# Altium footprint library chipfc_libs.PCBLIB: 315 footprints (part 11 of 20)
Each footprint in its own frame and in the unit in brackets; x right, y up, seen from the top. Pads: shape width x height; smd on the part's side, far side on the other; paste and mask are expansions set on the pad; w line width, h text height; cw(c..) or ccw(c..) is an arc to the next point about the centre after c.
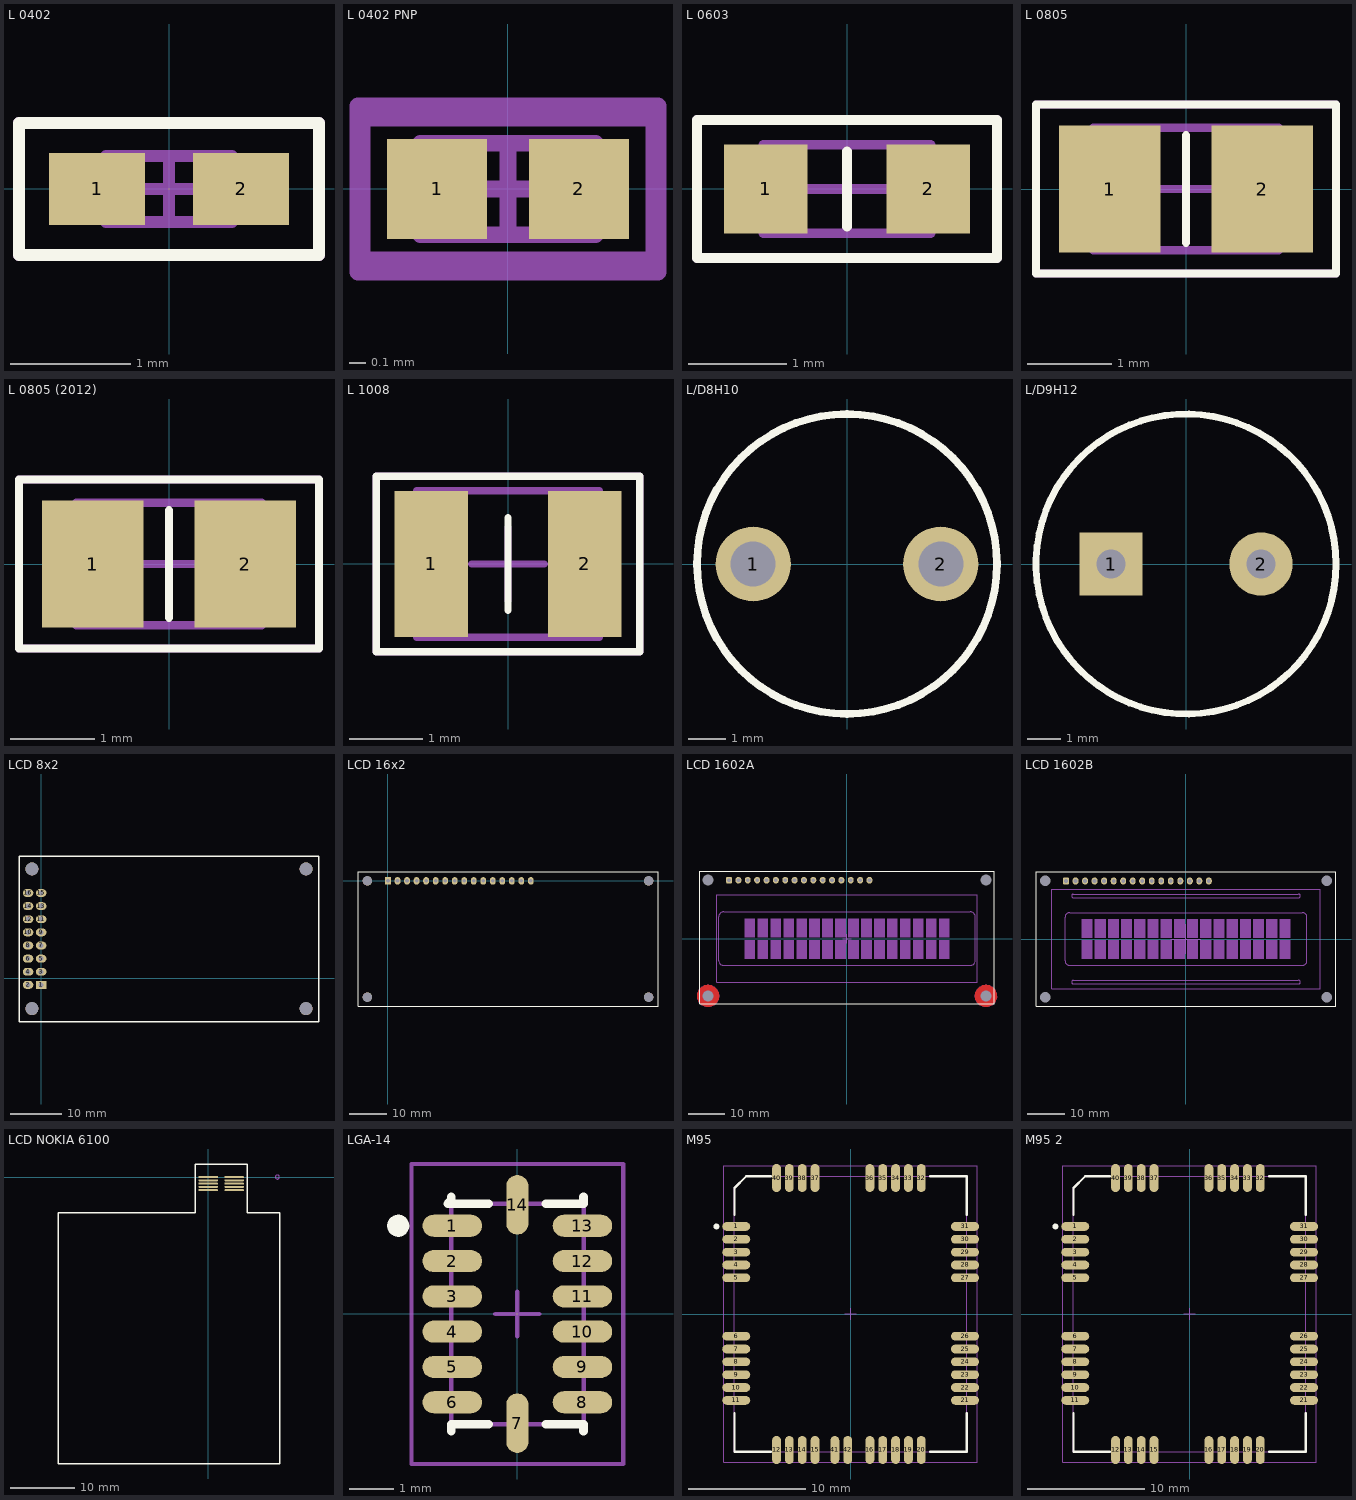
[diagram p10: the footprints below, top view; thin cyan lines are the x and y axes]

## L 0402 [mm] "Chip Capacitor, 2-Leads, Body 1.0x0.5mm, IPC Medium Density"
height 0.55
pads (2):
  rect 0.8x0.6 smd: 1(-0.6,0) 2(0.6,0)
Top Overlay:
  lines w0.1: -1.25,-0.55 1.25,-0.55 1.25,0.55 -1.25,0.55 -1.25,-0.55
Mechanical 13:
  lines w0.1: -0.525,-0.275 0.525,-0.275 0.525,0.275 -0.525,0.275 -0.525,-0.275
Mechanical 15:
  lines w0.1: -0.275,0 0.275,0 ; 0,-0.275 0,0.275 ; -1.25,-0.55 1.25,-0.55 1.25,0.55 -1.25,0.55 -1.25,-0.55
3D body "User Library-Chip Inductor-L0402 (1005).step": height 0.5, standoff 0, extent -0.5,-0.3 0.5,0.3

## L 0402 PNP [mm] "Chip Capacitor, 2-Leads, Body 1.0x0.5mm, IPC Medium Density"
height 0.55
pads (2):
  rect 0.6x0.6 smd: 1(-0.425,0) 2(0.425,0)
Mechanical 13:
  lines w0.1: -0.525,-0.275 0.525,-0.275 0.525,0.275 -0.525,0.275 -0.525,-0.275
Mechanical 15:
  lines w0.1: -0.275,0 0.275,0 ; 0,-0.275 0,0.275 ; -0.875,-0.425 0.875,-0.425 0.875,0.425 -0.875,0.425 -0.875,-0.425
Mechanical 31:
  lines w0.1: -0.9,-0.5 0.9,-0.5 0.9,0.5 -0.9,0.5 -0.9,-0.5
3D body "User Library-Chip Inductor-L0402 (1005).step": height 0.5, standoff 0, extent -0.5,-0.3 0.5,0.3

## L 0603 [mm] "Chip Capacitor, 2-Leads, Body 1.6x0.8mm, IPC Medium Density"
height 0.8
pads (2):
  rect 0.85x0.9 smd: 1(-0.825,0) 2(0.825,0)
Top Overlay:
  lines w0.1: 0,-0.381 0,0.381 ; -1.525,-0.7 1.525,-0.7 1.525,0.7 -1.525,0.7 -1.525,-0.7
Mechanical 13:
  lines w0.1: -0.85,-0.45 0.85,-0.45 0.85,0.45 -0.85,0.45 -0.85,-0.45
Mechanical 15:
  lines w0.1: -0.45,0 0.45,0 ; 0,-0.45 0,0.45 ; -1.525,-0.7 1.525,-0.7 1.525,0.7 -1.525,0.7 -1.525,-0.7
3D body "User Library-Chip Inductor-L0603 (1608).step": height 0.8, standoff 0, extent -0.8,-0.475 0.8,0.475

## L 0805 [mm] "Chip Capacitor, 2-Leads, Body 2.0x1.3mm, IPC Medium Density"
height 0.85
pads (2):
  rect 1.2x1.5 smd: 1(-0.9,0) 2(0.9,0)
Top Overlay:
  lines w0.1: 0,-0.635 0,0.635 ; -1.775,-1 1.775,-1 1.775,1 -1.775,1 -1.775,-1
Mechanical 13:
  lines w0.1: -1.1,-0.725 1.1,-0.725 1.1,0.725 -1.1,0.725 -1.1,-0.725
Mechanical 15:
  lines w0.1: -0.5,0 0.5,0 ; 0,-0.5 0,0.5 ; -1.775,-1 -1.775,1 1.775,1 1.775,-1 -1.775,-1
3D body "User Library-Chip Inductor-L0805 (2012).step": height 0.95, standoff 0, extent -1,-0.6 1,0.6

## L 0805 (2012) [mm] "Chip Capacitor, 2-Leads, Body 2.0x1.3mm, IPC Medium Density"
height 0.85
pads (2):
  rect 1.2x1.5 smd: 1(-0.9,0) 2(0.9,0)
Top Overlay:
  lines w0.1: 0,-0.635 0,0.635 ; -1.775,-1 -1.775,1 1.775,1 1.775,-1 -1.775,-1
Mechanical 13:
  lines w0.1: -1.1,-0.725 -1.1,0.725 1.1,0.725 1.1,-0.725 -1.1,-0.725
Mechanical 15:
  lines w0.1: -0.5,0 0.5,0 ; 0,-0.5 0,0.5 ; -1.775,-1 1.775,-1 1.775,1 -1.775,1 -1.775,-1
3D body "User Library-Chip Inductor-L0805 (2012).step": height 0.95, standoff 0, extent -1,-0.6 1,0.6

## L 1008 [mm] "Chip Capacitor, 2-Leads, Body 2.0x1.3mm, IPC Medium Density"
height 0.85
pads (2):
  rect 1x2 smd: 1(-1.05,0) 2(1.05,0)
Top Overlay:
  lines w0.1: 0,-0.635 0,0.635 ; -1.8,-1.2 1.8,-1.2 1.8,1.2 -1.8,1.2 -1.8,-1.2
Mechanical 13:
  lines w0.1: -1.25,-1 1.25,-1 1.25,1 -1.25,1 -1.25,-1
Mechanical 15:
  lines w0.1: -0.5,0 0.5,0 ; 0,-0.5 0,0.5 ; -1.8,-1.2 -1.8,1.2 1.8,1.2 1.8,-1.2 -1.8,-1.2
3D body "User Library-Chip Inductor.step": height 2.2, standoff 0, extent -1.25,-1 1.25,1

## L/D8H10 [mm] "inductor Dia (7.80mm) Heigh (10.00mm)"
pads (2):
  round 2 hole 1.2: 1(-2.5,0) 2(2.5,0)
Top Overlay:
  circle w0.203: c0,0 r4
3D body "STEP-WE-TI-HV-8095-rev1.stp": height 9.5, standoff -5, extent -5.515,-5.516 5.516,5.515

## L/D9H12 [mm] "inductor"
pads (2):
  rect 1.905x1.905 hole 0.864: 1(-2.25,0)
  round 1.905 hole 0.864: 2(2.25,0)
Top Overlay:
  circle w0.203: c0,0 r4.5
3D body "User Library-Inductor 10x12 (200 mils).STEP": height 12.13, standoff -3.87, extent -5,-5.115 5,4.885

## LCD 8x2 [mil]
pads (20):
  rect 80x60 / inner round 60 / far side rect 80x60 hole 38: 1(0,-50)
  oval 80x60 / inner round 60 / far side oval 80x60 hole 38: 2(-100,-50) 3(0,50) 4(-100,50) 5(0,150) 6(-100,150) 7(0,250) 8(-100,250) 9(0,350) 10(-100,350) 11(0,450) 12(-100,450) 13(0,550) 14(-100,550) 15(0,650) 16(-100,650)
  round 98.43 hole 98.43: HOLE(-70.47,832.28) HOLF(2016.14,832.28) HOLG(2016.14,-230.71) HOLH(-70.47,-230.71)
Top Overlay:
  lines w10: -168.9,-329.13 2114.57,-329.13 2114.57,927.95 -168.9,927.95 -168.9,-329.13

## LCD 16x2 [mil]
pads (20):
  rect 60x80 / inner round 60 / far side rect 60x80 hole 38: 1(0,0)
  oval 60x80 / inner round 60 / far side oval 60x80 hole 38: 2(100,0) 3(200,0) 4(300,0) 5(400,0) 6(500,0) 7(600,0) 8(700,0) 9(800,0) 10(900,0) 11(1000,0) 12(1100,0) 13(1200,0) 14(1300,0) 15(1400,0) 16(1500,0)
  round 98.43 hole 98.43: HOLE(-216.54,0) HOLF(2736.22,0) HOLG(2736.22,-1220.47) HOLH(-216.54,-1220.47)
Top Overlay:
  lines w10: -314.96,-1318.9 -314.96,98.43 2834.65,98.43 2834.65,-1318.9 -314.96,-1318.9
3D body "User Library-AC162B.step": height 433.07, standoff -114.17, extent -314.96,-1318.9 2834.65,98.43

## LCD 1602A [mm]
pads (20):
  rrect50% 1.6x1.8 hole 1: 1(-32,15.85)
  oval 1.6x1.8 hole 1: 2(-29.46,15.85) 3(-26.92,15.85) 4(-24.38,15.85) 5(-21.84,15.85) 6(-19.3,15.85) 7(-16.76,15.85) 8(-14.22,15.85) 9(-11.68,15.85) 10(-9.14,15.85) 11(-6.6,15.85) 12(-4.06,15.85) 13(-1.52,15.85) 14(1.02,15.85) 15(3.56,15.85) 16(6.1,15.85)
  round 0 hole 3 unplated: HOLE(-37.7,15.85) HOLF(37.7,15.85) HOLG(37.7,-15.55) HOLH(-37.7,-15.55)
Top Layer:
  pour cut-out: -40.7,-15.55 -40.7,-15.747 -40.649,-16.137 -40.547,-16.516 -40.396,-16.88 -40.2,-17.22 -39.96,-17.532 -39.682,-17.81 -39.37,-18.05 -39.03,-18.246 -38.666,-18.397 -38.287,-18.499 -37.897,-18.55 -37.7,-18.55 -37.503,-18.55 -37.113,-18.499 -36.734,-18.397 -36.37,-18.246 -36.03,-18.05 -35.718,-17.81 -35.44,-17.532 -35.2,-17.22 -35.004,-16.88 -34.853,-16.516 -34.751,-16.136 -34.7,-15.747 -34.7,-15.55 -34.7,-15.353 -34.751,-14.963 -34.853,-14.584 -35.004,-14.22 -35.2,-13.88 -35.44,-13.568 -35.718,-13.29 -36.03,-13.05 -36.37,-12.854 -36.734,-12.703 -37.113,-12.601 -37.503,-12.55 -37.7,-12.55 -37.897,-12.55 -38.287,-12.601 -38.666,-12.703 -39.03,-12.854 -39.37,-13.05 -39.682,-13.29 -39.96,-13.568 -40.2,-13.88 -40.396,-14.22 -40.547,-14.584 -40.649,-14.963 -40.7,-15.353
  pour cut-out: 34.7,-15.55 34.7,-15.747 34.751,-16.137 34.853,-16.516 35.004,-16.88 35.2,-17.22 35.44,-17.532 35.718,-17.81 36.03,-18.05 36.37,-18.246 36.734,-18.397 37.113,-18.499 37.503,-18.55 37.7,-18.55 37.897,-18.55 38.287,-18.499 38.666,-18.397 39.03,-18.246 39.37,-18.05 39.682,-17.81 39.96,-17.532 40.2,-17.22 40.396,-16.88 40.547,-16.516 40.649,-16.136 40.7,-15.747 40.7,-15.55 40.7,-15.353 40.649,-14.963 40.547,-14.584 40.396,-14.22 40.2,-13.88 39.96,-13.568 39.682,-13.29 39.37,-13.05 39.03,-12.854 38.666,-12.703 38.287,-12.601 37.897,-12.55 37.7,-12.55 37.503,-12.55 37.113,-12.601 36.734,-12.703 36.37,-12.854 36.03,-13.05 35.718,-13.29 35.44,-13.568 35.2,-13.88 35.004,-14.22 34.853,-14.584 34.751,-14.963 34.7,-15.353
Bottom Layer:
  pour cut-out: -40.7,-15.55 -40.7,-15.747 -40.649,-16.137 -40.547,-16.516 -40.396,-16.88 -40.2,-17.22 -39.96,-17.532 -39.682,-17.81 -39.37,-18.05 -39.03,-18.246 -38.666,-18.397 -38.287,-18.499 -37.897,-18.55 -37.7,-18.55 -37.503,-18.55 -37.113,-18.499 -36.734,-18.397 -36.37,-18.246 -36.03,-18.05 -35.718,-17.81 -35.44,-17.532 -35.2,-17.22 -35.004,-16.88 -34.853,-16.516 -34.751,-16.136 -34.7,-15.747 -34.7,-15.55 -34.7,-15.353 -34.751,-14.963 -34.853,-14.584 -35.004,-14.22 -35.2,-13.88 -35.44,-13.568 -35.718,-13.29 -36.03,-13.05 -36.37,-12.854 -36.734,-12.703 -37.113,-12.601 -37.503,-12.55 -37.7,-12.55 -37.897,-12.55 -38.287,-12.601 -38.666,-12.703 -39.03,-12.854 -39.37,-13.05 -39.682,-13.29 -39.96,-13.568 -40.2,-13.88 -40.396,-14.22 -40.547,-14.584 -40.649,-14.963 -40.7,-15.353
  pour cut-out: 34.7,-15.55 34.7,-15.747 34.751,-16.137 34.853,-16.516 35.004,-16.88 35.2,-17.22 35.44,-17.532 35.718,-17.81 36.03,-18.05 36.37,-18.246 36.734,-18.397 37.113,-18.499 37.503,-18.55 37.7,-18.55 37.897,-18.55 38.287,-18.499 38.666,-18.397 39.03,-18.246 39.37,-18.05 39.682,-17.81 39.96,-17.532 40.2,-17.22 40.396,-16.88 40.547,-16.516 40.649,-16.136 40.7,-15.747 40.7,-15.55 40.7,-15.353 40.649,-14.963 40.547,-14.584 40.396,-14.22 40.2,-13.88 39.96,-13.568 39.682,-13.29 39.37,-13.05 39.03,-12.854 38.666,-12.703 38.287,-12.601 37.897,-12.55 37.7,-12.55 37.503,-12.55 37.113,-12.601 36.734,-12.703 36.37,-12.854 36.03,-13.05 35.718,-13.29 35.44,-13.568 35.2,-13.88 35.004,-14.22 34.853,-14.584 34.751,-14.963 34.7,-15.353
Top Overlay:
  lines w0.254: -40,-17.65 40,-17.65 40,18.35 -40,18.35 -40,-17.65
Mechanical 1:
  circle w0.254: c-37.7,-15.55 r2
  circle w0.254: c37.7,-15.55 r2
Mechanical 13:
  rectangle: -27.85,0.35 -24.95,5.5
  rectangle: -27.85,-5.5 -24.95,-0.35
  rectangle: -24.33,-5.5 -21.43,-0.35
  rectangle: -24.33,0.35 -21.43,5.5
  rectangle: -20.81,-5.5 -17.91,-0.35
  rectangle: -20.81,0.35 -17.91,5.5
  rectangle: -17.29,-5.5 -14.39,-0.35
  rectangle: -17.29,0.35 -14.39,5.5
  rectangle: -13.77,-5.5 -10.87,-0.35
  rectangle: -13.77,0.35 -10.87,5.5
  rectangle: -10.25,-5.5 -7.35,-0.35
  rectangle: -10.25,0.35 -7.35,5.5
  rectangle: -6.73,-5.5 -3.83,-0.35
  rectangle: -6.73,0.35 -3.83,5.5
  rectangle: -3.21,-5.5 -0.31,-0.35
  rectangle: -3.21,0.35 -0.31,5.5
  rectangle: 0.31,-5.5 3.21,-0.35
  rectangle: 0.31,0.35 3.21,5.5
  rectangle: 3.83,-5.5 6.73,-0.35
  rectangle: 3.83,0.35 6.73,5.5
  rectangle: 7.35,-5.5 10.25,-0.35
  rectangle: 7.35,0.35 10.25,5.5
  rectangle: 10.87,-5.5 13.77,-0.35
  rectangle: 10.87,0.35 13.77,5.5
  rectangle: 14.39,-5.5 17.29,-0.35
  rectangle: 14.39,0.35 17.29,5.5
  rectangle: 17.91,-5.5 20.81,-0.35
  rectangle: 17.91,0.35 20.81,5.5
  rectangle: 21.43,-5.5 24.33,-0.35
  rectangle: 21.43,0.35 24.33,5.5
  rectangle: 24.95,-5.5 27.85,-0.35
  rectangle: 24.95,0.35 27.85,5.5
  lines w0.203: -1.2,0 1.2,0 ; 0,-1.2 0,1.2 ; -35.4,-11.9 -35.4,11.9 35.4,11.9 35.4,-11.9 -35.4,-11.9 ; -34.8,-5.95 ccw(c-33.5,-5.95) -33.5,-7.25 33.5,-7.25 ccw(c33.5,-5.95) 34.8,-5.95 34.8,5.95 ccw(c33.5,5.95) 33.5,7.25 -33.5,7.25 ccw(c-33.5,5.95) -34.8,5.95 -34.8,-5.95
3D body: height 0, standoff -6, extent -39.2,-17.05 -36.2,-14.05
3D body: height 11, standoff 0, extent -40.615,-18.099 -34.785,-13.001
3D body: height 0, standoff -6, extent 36.2,-17.05 39.2,-14.05
3D body: height 11, standoff 0, extent 34.785,-18.099 40.615,-13.001
3D body "User Library-AC162B.step": height 22, standoff 8.1, extent -40,-17.65 40,18.35

## LCD 1602B [mm]
pads (20):
  rrect50% 1.575x1.905 hole 0.991: 1(-32,15.46)
  oval 1.575x1.905 hole 0.991: 2(-29.46,15.46) 3(-26.92,15.46) 4(-24.38,15.46) 5(-21.84,15.46) 6(-19.3,15.46) 7(-16.76,15.46) 8(-14.22,15.46) 9(-11.68,15.46) 10(-9.14,15.46) 11(-6.6,15.46) 12(-4.06,15.46) 13(-1.52,15.46) 14(1.02,15.46) 15(3.56,15.46) 16(6.1,15.46)
  round 0 hole 2.8: HOLE(-37.55,15.5) HOLF(37.55,15.5) HOLG(37.55,-15.5) HOLH(-37.55,-15.5)
Top Overlay:
  lines w0.254: -40,-18 -40,18 40,18 40,-18 -40,-18
Mechanical 1:
  lines w0.203: -4,0 4,0 ; 0,-4 0,4
Mechanical 13:
  rectangle: 24.9,0.3 27.9,5.32
  rectangle: 24.9,-5.32 27.9,-0.3
  rectangle: 21.38,0.3 24.38,5.32
  rectangle: 21.38,-5.32 24.38,-0.3
  rectangle: 17.86,0.3 20.86,5.32
  rectangle: 17.86,-5.32 20.86,-0.3
  rectangle: 14.34,0.3 17.34,5.32
  rectangle: 14.34,-5.32 17.34,-0.3
  rectangle: 10.82,0.3 13.82,5.32
  rectangle: 10.82,-5.32 13.82,-0.3
  rectangle: 7.3,0.3 10.3,5.32
  rectangle: 7.3,-5.32 10.3,-0.3
  rectangle: 3.78,0.3 6.78,5.32
  rectangle: 3.78,-5.32 6.78,-0.3
  rectangle: 0.26,0.3 3.26,5.32
  rectangle: 0.26,-5.32 3.26,-0.3
  rectangle: -3.26,0.3 -0.26,5.32
  rectangle: -3.26,-5.32 -0.26,-0.3
  rectangle: -6.78,0.3 -3.78,5.32
  rectangle: -6.78,-5.32 -3.78,-0.3
  rectangle: -10.3,0.3 -7.3,5.32
  rectangle: -10.3,-5.32 -7.3,-0.3
  rectangle: -13.82,0.3 -10.82,5.32
  rectangle: -13.82,-5.32 -10.82,-0.3
  rectangle: -17.34,0.3 -14.34,5.32
  rectangle: -17.34,-5.32 -14.34,-0.3
  rectangle: -20.86,0.3 -17.86,5.32
  rectangle: -20.86,-5.32 -17.86,-0.3
  rectangle: -24.38,0.3 -21.38,5.32
  rectangle: -24.38,-5.32 -21.38,-0.3
  rectangle: -27.9,-5.32 -24.9,-0.3
  rectangle: -27.9,0.3 -24.9,5.32
  lines w0.203: -35.75,-13.25 -35.75,13.25 35.75,13.25 35.75,-13.25 -35.75,-13.25 ; -32.25,-5.75 ccw(c-31,-5.75) -31,-7 31,-7 ccw(c31,-5.75) 32.25,-5.75 32.25,5.75 ccw(c31,5.75) 31,7 -31,7 ccw(c-31,5.75) -32.25,5.75 -32.25,-5.75 ; -30,-12 cw(c-30,-11.5) -30,-11 30,-11 cw(c30,-11.5) 30,-12 -30,-12 ; -30,11 cw(c-30,11.5) -30,12 30,12 cw(c30,11.5) 30,11 -30,11
3D body "User Library-AC162B.step": height 11, standoff -2.9, extent -40,-18 40,18

## LCD NOKIA 6100 [mil]
pads (10):
  rect 120x12 smd: 1(0,0)
  oval 120x12 smd: 2(0,-20) 3(0,-40) 4(0,-60) 5(0,-80) 6(160,-80) 7(160,-60) 8(160,-40) 9(160,-20) 10(160,0)
Top Overlay:
  lines w8: -920,-1760 440,-1760 440,-220 240,-220 240,80 -80,80 -80,-220 -920,-220 -920,-1760
Mechanical 3:
  lines w4: 412.5,0 cw(c425,0) 425,12.5 cw(c425,0) 437.5,0 cw(c425,0) 425,-12.5 cw(c425,0) 412.5,0

## LGA-14 [mm] "LCC, 14-Pins, Body 3.0x5.0mm (max), Pitch 0.80mm, IPC Medium Density"
height 1
pads (14):
  oval 1.35x0.5 smd: 1(-1.475,2) 2(-1.475,1.2) 3(-1.475,0.4) 4(-1.475,-0.4) 5(-1.475,-1.2) 6(-1.475,-2) 8(1.475,-2) 9(1.475,-1.2) 10(1.475,-0.4) 11(1.475,0.4) 12(1.475,1.2) 13(1.475,2)
  oval 0.5x1.35 smd: 7(0,-2.475) 14(0,2.475)
Top Overlay:
  circle w0.25: c-2.7,2 r0.125
  lines w0.2: -1.5,-2.65 -1.5,-2.5 -0.65,-2.5 ; -1.5,2.65 -1.5,2.575 -1.575,2.5 -0.65,2.5 ; 0.65,-2.5 1.5,-2.5 1.5,-2.65 ; 0.65,2.5 1.5,2.5 1.5,2.65
Mechanical 13:
  lines w0.1: -1.575,2.5 -1.5,2.575 -1.5,-2.5 1.5,-2.5 1.5,2.5 -1.575,2.5
Mechanical 15:
  lines w0.1: -0.5,0 0.5,0 ; 0,-0.5 0,0.5 ; -2.4,-3.4 2.4,-3.4 2.4,3.4 -2.4,3.4 -2.4,-3.4
3D body "SW3dPS-LGA-14.STEP": height 1.03, standoff -0.4, extent -1.5,-2.5 1.5,2.5

## M95 [mm] "LCC, 54-Pins, Body 19.9x23.6mm (max), Pitch 1.10mm, IPC Medium Density"
height 2.65
pads (42):
  oval 2.4x0.75 smd: 1(-9.8,7.5) 2(-9.8,6.4) 3(-9.8,5.3) 4(-9.8,4.2) 5(-9.8,3.1) 6(-9.8,-1.9) 7(-9.8,-3) 8(-9.8,-4.1) 9(-9.8,-5.2) 10(-9.8,-6.3) 11(-9.8,-7.4) 21(9.8,-7.4) 22(9.8,-6.3) 23(9.8,-5.2) 24(9.8,-4.1) 25(9.8,-3) 26(9.8,-1.9) 27(9.8,3.1) 28(9.8,4.2) 29(9.8,5.3) 30(9.8,6.4) 31(9.8,7.5)
  oval 0.75x2.4 smd: 12(-6.35,-11.65) 13(-5.25,-11.65) 14(-4.15,-11.65) 15(-3.05,-11.65) 16(1.65,-11.65) 17(2.75,-11.65) 18(3.85,-11.65) 19(4.95,-11.65) 20(6.05,-11.65) 32(6.05,11.65) 33(4.95,11.65) 34(3.85,11.65) 35(2.75,11.65) 36(1.65,11.65) 37(-3.05,11.65) 38(-4.15,11.65) 39(-5.25,11.65) 40(-6.35,11.65) 41(-1.35,-11.65) 42(-0.25,-11.65)
Top Overlay:
  circle w0.25: c-11.5,7.5 r0.125
  lines w0.2: -9.95,-8.475 -9.95,-11.8 -6.825,-11.8 ; -9.95,8.475 -9.95,10.8 -8.95,11.8 -6.825,11.8 ; 6.825,-11.8 9.95,-11.8 9.95,-8.475 ; 6.825,11.8 9.95,11.8 9.95,8.475
Mechanical 13:
  lines w0.1: -9.95,-11.8 -9.95,10.8 -8.95,11.8 9.95,11.8 9.95,-11.8 -9.95,-11.8
Mechanical 15:
  lines w0.1: -0.5,0 0.5,0 ; 0,-0.5 0,0.5 ; -10.85,-12.7 -10.85,12.7 10.85,12.7 10.85,-12.7 -10.85,-12.7
3D body "User Library-Quectel M95.step": height 2.66, standoff 0, extent -10,-11.8 9.9,11.8

## M95 2 [mm] "LCC, 54-Pins, Body 19.9x23.6mm (max), Pitch 1.10mm, IPC Medium Density"
height 2.65
pads (40):
  oval 2.4x0.75 smd: 1(-9.8,7.5) 2(-9.8,6.4) 3(-9.8,5.3) 4(-9.8,4.2) 5(-9.8,3.1) 6(-9.8,-1.9) 7(-9.8,-3) 8(-9.8,-4.1) 9(-9.8,-5.2) 10(-9.8,-6.3) 11(-9.8,-7.4) 21(9.8,-7.4) 22(9.8,-6.3) 23(9.8,-5.2) 24(9.8,-4.1) 25(9.8,-3) 26(9.8,-1.9) 27(9.8,3.1) 28(9.8,4.2) 29(9.8,5.3) 30(9.8,6.4) 31(9.8,7.5)
  oval 0.75x2.4 smd: 12(-6.35,-11.65) 13(-5.25,-11.65) 14(-4.15,-11.65) 15(-3.05,-11.65) 16(1.65,-11.65) 17(2.75,-11.65) 18(3.85,-11.65) 19(4.95,-11.65) 20(6.05,-11.65) 32(6.05,11.65) 33(4.95,11.65) 34(3.85,11.65) 35(2.75,11.65) 36(1.65,11.65) 37(-3.05,11.65) 38(-4.15,11.65) 39(-5.25,11.65) 40(-6.35,11.65)
Top Overlay:
  circle w0.25: c-11.5,7.5 r0.125
  lines w0.2: -9.95,-8.475 -9.95,-11.8 -6.825,-11.8 ; -9.95,8.475 -9.95,10.8 -8.95,11.8 -6.825,11.8 ; 6.825,-11.8 9.95,-11.8 9.95,-8.475 ; 6.825,11.8 9.95,11.8 9.95,8.475
Mechanical 13:
  lines w0.1: -9.95,-11.8 9.95,-11.8 9.95,11.8 -8.95,11.8 -9.95,10.8 -9.95,-11.8
Mechanical 15:
  lines w0.1: -0.5,0 0.5,0 ; 0,-0.5 0,0.5 ; -10.85,-12.7 10.85,-12.7 10.85,12.7 -10.85,12.7 -10.85,-12.7
3D body "User Library-Quectel M95.step": height 2.66, standoff 0, extent -10,-11.8 9.9,11.8